# Altium integrated library truyen_lib_vip.IntLib: 11 symbols
Pins are listed as number, name and electrical type; pins without a type are passive.

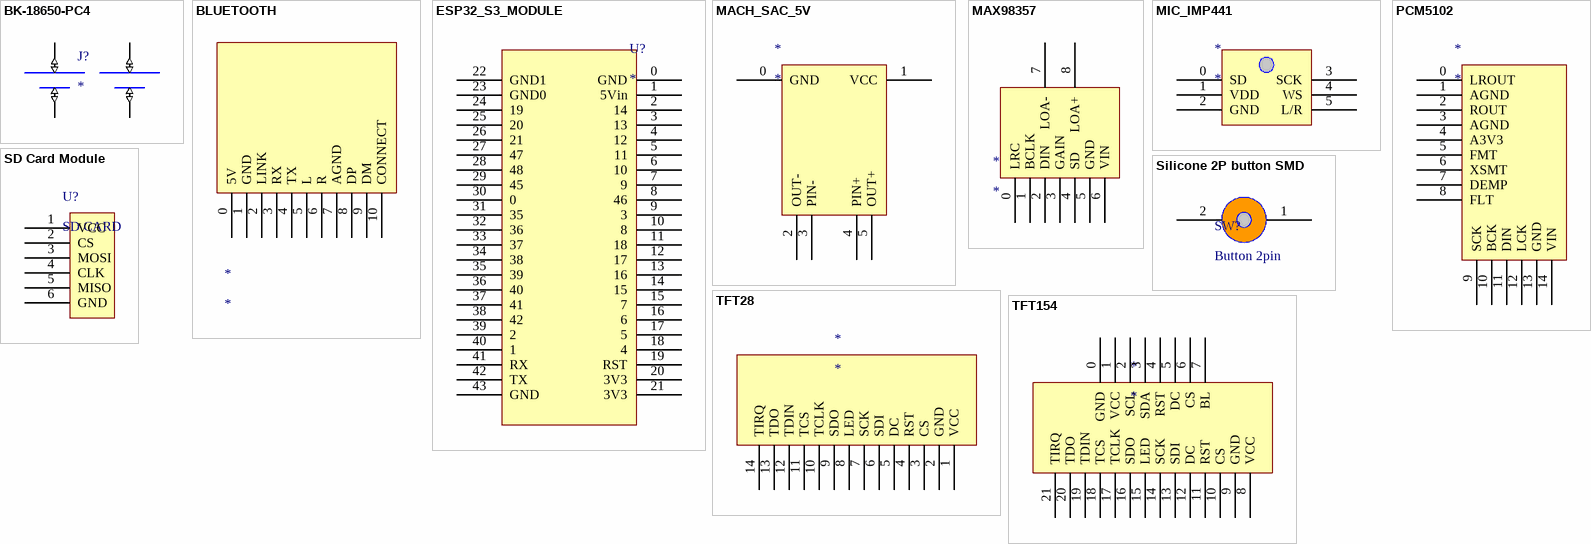
[diagram p0: symbols BK-18650-PC4 to TFT154]

## BK-18650-PC4
designator J?
Battery Holder (Open) 18650 2 Cell PC Pin; MF: MPD (Memory Protection Devices); MP: BK-18650-PC4; SnapEDA_Link: https://www.snapeda.com/parts/BK-18650-PC4/Memory+Protection+Devices/view-part/?ref=snap; Package: None; Value: *; Check_prices: https://www.snapeda.com/parts/BK-18650-PC4/Memory+Protection+Devices/view-part/?ref=eda
footprint 18650-PC4
pins: +1 (io), +2 (io), -1 (io), -2 (io)

## BLUETOOTH
designator *
footprint BLE
pins: 0 5V, 1 GND, 2 LINK, 3 RX, 4 TX, 5 L, 6 R, 7 AGND, 8 DP, 9 DM, 10 CONNECT

## ESP32_S3_MODULE
designator U?
footprint ESP32_S3_MODULE
pins: 0 GND, 1 5Vin, 2 14, 3 13, 4 12, 5 11, 6 10, 7 9, 8 46, 9 3, 10 8, 11 18, 12 17, 13 16, 14 15, 15 7, 16 6, 17 5, 18 4, 19 RST, 20 3V3, 21 3V3, 22 GND1, 23 GND0, 24 19, 25 20, 26 21, 27 47, 28 48, 29 45, 30 0, 31 35, 32 36, 33 37, 34 38, 35 39, 36 40, 37 41, 38 42, 39 2, 40 1, 41 RX, 42 TX, 43 GND

## MACH_SAC_5V
designator *
footprint TP4056
pins: 0 GND, 1 VCC, 2 OUT-, 3 PIN-, 4 PIN+, 5 OUT+

## MAX98357
designator *
footprint MAX98357
pins: 0 LRC, 1 BCLK, 2 DIN, 3 GAIN, 4 SD, 5 GND, 6 VIN, 7 LOA-, 8 LOA+

## MIC_IMP441
designator *
footprint IMP441
pins: 0 SD, 1 VDD, 2 GND, 3 SCK, 4 WS, 5 L/R

## PCM5102
designator *
footprint PCM5102
pins: 0 LROUT, 1 AGND, 2 ROUT, 3 AGND, 4 A3V3, 5 FMT, 6 XSMT, 7 DEMP, 8 FLT, 9 SCK, 10 BCK, 11 DIN, 12 LCK, 13 GND, 14 VIN

## SD Card Module
designator U?, comment SD CARD
footprint SDCARD_MODULE
pins: 1 VCC, 2 CS, 3 MOSI, 4 CLK, 5 MISO, 6 GND

## Silicone 2P button SMD
designator SW?, comment Button 2pin
footprint Button2Psilicon
pins: 1, 2

## TFT28
designator *
footprint TFT - duplicate
pins: 1 VCC, 2 GND, 3 CS, 4 RST, 5 DC, 6 SDI, 7 SCK, 8 LED, 9 SDO, 10 TCLK, 11 TCS, 12 TDIN, 13 TDO, 14 TIRQ

## TFT154
designator *
footprint TFT
pins: 0 GND, 1 VCC, 2 SCL, 3 SDA, 4 RST, 5 DC, 6 CS, 7 BL, 8 VCC, 9 GND, 10 CS, 11 RST, 12 DC, 13 SDI, 14 SCK, 15 LED, 16 SDO, 17 TCLK, 18 TCS, 19 TDIN, 20 TDO, 21 TIRQ